# Altium footprint library NTM_Connectors.PcbLib: 10 footprints
Each footprint in its own frame and in the unit in brackets; x right, y up, seen from the top. Pads: shape width x height; smd on the part's side, far side on the other; paste and mask are expansions set on the pad; w line width, h text height; cw(c..) or ccw(c..) is an arc to the next point about the centre after c.
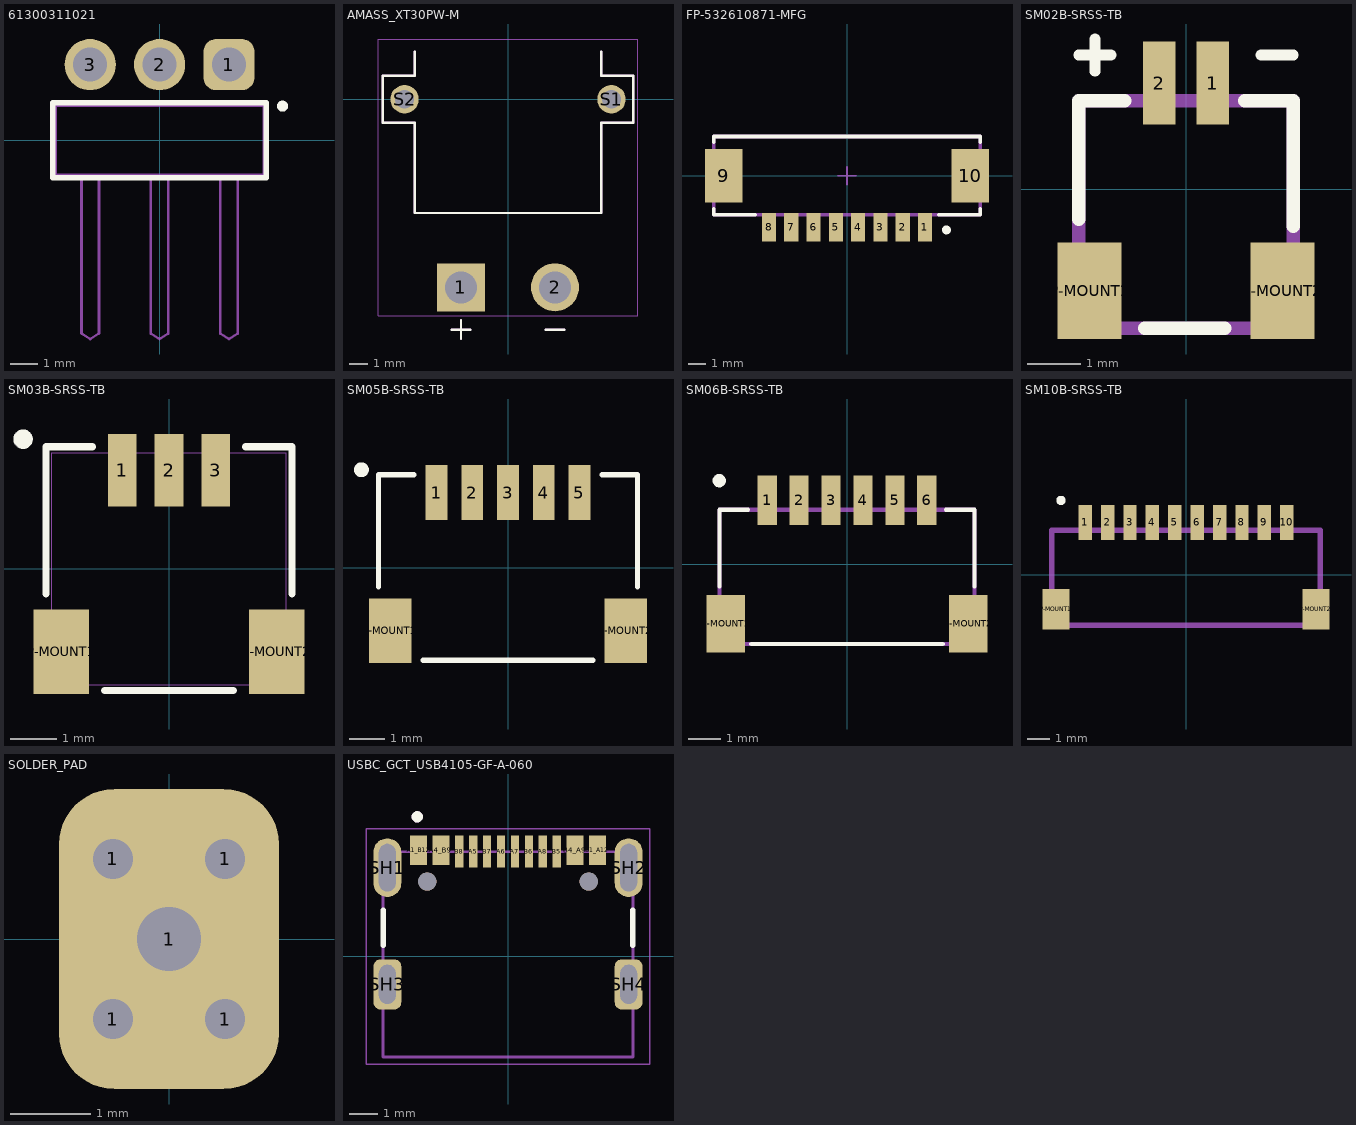
[diagram p0: the footprints below, top view; thin cyan lines are the x and y axes]

## 61300311021 [mm]
pads (3):
  rrect50% 1.875x1.875 hole 1.25 mask+0.102: 1(2.54,2.77)
  round 1.875 hole 1.25 mask+0.102: 2(0,2.77) 3(-2.54,2.77)
Top Overlay:
  circle w0.2: c4.5,1.25 r0.1
  lines w0.2: -3.91,-1.37 -3.91,1.37 3.91,1.37 3.91,-1.37 -3.91,-1.37
Top 3D Body:
  lines w0.1: -2.86,-1.27 -2.86,-7.07 -2.54,-7.27 -2.22,-7.07 -2.22,-1.27 ; 2.22,-1.27 2.22,-7.07 2.54,-7.27 2.86,-7.07 2.86,-1.27 ; -0.32,-1.27 -0.32,-7.07 0,-7.27 0.32,-7.07 0.32,-1.27 ; -0.32,-1.27 -3.81,-1.27 -3.81,1.27 3.81,1.27 3.81,-1.27 0.32,-1.27 ; -0.32,-1.27 0.32,-1.27
3D body "step_temp.STEP": height 2.54, standoff -3, extent -3.81,-7.27 3.81,3.09

## AMASS_XT30PW-M [mm]
height 5
pads (4):
  rect 2.55x2.55 / inner round 2.55 / far side rect 2.55x2.55 hole 1.7: 1(-2.5,-10)
  round 2.55 hole 1.7: 2(2.5,-10)
  round 1.508 hole 1: S1(5.5,0) S2(-5.5,0)
Top Overlay:
  lines w0.127: -4.95,2.52 -4.95,1.25 -6.65,1.25 -6.65,-1.25 -4.95,-1.25 -4.95,-6.05 4.95,-6.05 4.95,-1.25 6.65,-1.25 6.65,1.25 4.95,1.25 4.95,2.52 ; -3,-12.25 -2,-12.25 ; -2.5,-12.75 -2.5,-11.75 ; 2,-12.25 3,-12.25
Top 3D Body:
  lines w0.127: -4.95,2.52 -4.95,1.25 -6.65,1.25 -6.65,-1.25 -4.95,-1.25 -4.95,-6.05 4.95,-6.05 4.95,-1.25 6.65,-1.25 6.65,1.25 4.95,1.25 4.95,2.52 ; -3,-12.25 -2,-12.25 ; -2.5,-12.75 -2.5,-11.75 ; 2,-12.25 3,-12.25
Mechanical 15:
  lines w0.05: -6.9,-11.525 6.9,-11.525 6.9,3.2 -6.9,3.2 -6.9,-11.525
3D body "step_temp.STEP": height 5, standoff -2, extent -6.65,-11 6.65,2.95

## FP-532610871-MFG [mm]
pads (10):
  rect 0.8x1.6 smd paste+0 mask+0.051: 1(4.375,-2.9) 2(3.125,-2.9) 3(1.875,-2.9) 4(0.625,-2.9) 5(-0.625,-2.9) 6(-1.875,-2.9) 7(-3.125,-2.9) 8(-4.375,-2.9)
  rect 2.1x3 smd paste+0 mask+0.051: 9(-6.925,0) 10(6.925,0)
Top Overlay:
  circle w0.25: c5.588,-3.048 r0.125
  lines w0.2: -7.475,-1.875 -7.475,-2.2 -5.15,-2.2 ; -7.475,1.875 -7.475,2.2 7.475,2.2 7.475,1.875 ; 5.15,-2.2 7.475,-2.2 7.475,-1.875
Top 3D Body:
  lines w0.2: -7.475,-2.2 7.475,-2.2 7.475,2.2 -7.475,2.2 -7.475,-2.2
Top Component Center:
  lines w0.1: -0.5,0 0.5,0 ; 0,-0.5 0,0.5
3D body "Conn_Molex_532610871_eec.STEP": height 0.25, standoff 0, extent -8.075,-3.8 8.075,2.3

## SM02B-SRSS-TB [mm]
pads (4):
  rect 0.6x1.55 smd paste+0 mask+0.051: 1(0.5,1.975) 2(-0.5,1.975)
  rect 1.2x1.8 smd paste+0 mask+0.051: P-MOUNT1(-1.8,-1.9) P-MOUNT2(1.8,-1.9)
Top Overlay:
  lines w0.2: -2,2.5 -1.4,2.5 ; -1.7,2.2 -1.7,2.8 ; 1.4,2.5 2,2.5
  lines w0.254: -2,-0.563 -2,1.65 -1.145,1.65 ; -0.767,-2.6 0.722,-2.6 ; 1.1,1.65 2,1.65 2,-0.697
Top 3D Body:
  lines w0.254: -2,-2.6 -2,1.65 2,1.65 2,-2.6 -2,-2.6
3D body "step_temp.STEP": height 2.95, standoff 0, extent -2,-2.475 2,2.475

## SM03B-SRSS-TB [mil]
pads (5):
  rect 24x61 smd paste+0 mask+2: 1(-39.37,82.68) 2(0,82.68) 3(39.37,82.68)
  rect 47x71 smd mask+2: P-MOUNT1(-90.55,-69.88) P-MOUNT2(90.55,-69.88)
Top Overlay:
  circle w10: c-122.64,108.81 r3.15
  lines w6: -103.43,-21.28 -103.43,102.44 -64.47,102.44 ; -53.95,-102.44 53.95,-102.44 ; 64.47,102.44 103.43,102.44 103.43,-21.28
Top 3D Body:
  lines w1: -98.43,-97.44 98.43,-97.44 98.43,97.44 -98.43,97.44 -98.43,-97.44
3D body "SM03B-SRSS-TB(LF)(SN)--3DModel-STEP-56544.STEP": height 116.15, standoff -0.39, extent -98.43,-97.24 98.43,97.64

## SM05B-SRSS-TB [mil]
pads (7):
  rect 24x61 smd paste+0 mask+2: 1(-78.74,82.68) 2(-39.37,82.68) 3(0,82.68) 4(39.37,82.68) 5(78.74,82.68)
  rect 47x71 smd mask+2: P-MOUNT1(-129.92,-69.88) P-MOUNT2(129.92,-69.88)
Top Overlay:
  circle w10: c-161.64,107.81 r3.15
  lines w6: -142.8,-21.28 -142.8,102.44 -103.84,102.44 ; -93.31,-102.44 93.31,-102.44 ; 103.86,102.44 142.81,102.44 142.8,-21.28
3D body "step_temp.STEP": height 116.14, standoff 0, extent -137.8,-97.44 137.8,97.44

## SM06B-SRSS-TB [mm]
pads (8):
  rect 0.6x1.55 smd mask+0.051: 1(-2.5,2) 2(-1.5,2) 3(-0.5,2) 4(0.5,2) 5(1.5,2) 6(2.5,2)
  rect 1.2x1.8 smd mask+0.051: P-MOUNT1(-3.8,-1.875) P-MOUNT2(3.8,-1.875)
Top Overlay:
  circle w0.254: c-4.004,2.611 r0.08
  lines w0.127: -4,-0.7 -4,1.7 -3.1,1.7 ; -3,-2.5 3,-2.5 ; 3.1,1.7 4,1.7 4,-0.7
Top 3D Body:
  lines w0.127: -4,-2.5 4,-2.5 4,1.7 -4,1.7 -4,-2.5
3D body "step_temp.STEP": height 2.95, standoff 0, extent -4,-2.634 4,2.316

## SM10B-SRSS-TB [mm]
pads (12):
  rect 0.6x1.55 smd mask+0.051: 1(-4.5,2.342) 2(-3.5,2.342) 3(-2.5,2.342) 4(-1.5,2.342) 5(-0.5,2.342) 6(0.5,2.342) 7(1.5,2.342) 8(2.5,2.342) 9(3.5,2.342) 10(4.5,2.342)
  rect 1.2x1.8 smd mask+0.051: P-MOUNT1(-5.8,-1.533) P-MOUNT2(5.8,-1.533)
Top Overlay:
  circle w0.254: c-5.585,3.329 r0.08
Mechanical 3:
  lines w0.254: -6,-2.25 -6,2 6,2 6,-2.25 -6,-2.25
Mechanical 7:
  lines w0.254: -6,-0.423 -6,2 -5.018,2 ; -4.976,-2.25 0,-2.25 4.993,-2.25 ; 5.022,2 6,2 6,-0.423
3D body "SM10B-SRSS-TB_LF__SN_.stp": height 2.97, standoff 0, extent -6,-2.3 6,2.65

## SOLDER_PAD [mm]
pads (5):
  round 0.9 hole 0.5 mask+0: 1(-0.7,-1) 1(-0.7,1) 1(0.7,-1) 1(0.7,1)
  rrect50% 2.75x3.75 hole 0.8 mask+0.051: 1(0,0)

## USBC_GCT_USB4105-GF-A-060 [mm]
height 3.31
pads (18):
  rect 0.6x1.05 smd paste+0 mask+0.025: A1_B12(-3.2,3.805) A4_B9(-2.4,3.805) B1_A12(3.2,3.805) B4_A9(2.4,3.805)
  rect 0.3x1.15 smd paste+0 mask+0.025: A5(-1.25,3.755) A6(-0.25,3.755) A7(0.25,3.755) A8(1.25,3.755) B5(1.75,3.755) B6(0.75,3.755) B7(-0.75,3.755) B8(-1.75,3.755)
  oval 1x2.1 hole 0.6 slot 1.7 at 90 deg: SH1(-4.32,3.18) SH2(4.32,3.18)
  rrect50% 1x1.8 hole 0.6 slot 1.4 at 90 deg: SH3(-4.32,-1) SH4(4.32,-1)
  round 0.65 hole 0.65 unplated mask+0: ""(-2.89,2.68) ""(2.89,2.68)
Top Overlay:
  circle w0.2: c-3.25,5 r0.1
  lines w0.2: -4.47,0.4 -4.47,1.65 ; 4.47,0.4 4.47,1.65
Top 3D Body:
  circle w0.2: c-3.25,5 r0.1
  lines w0.1: -4.47,-3.6 4.47,-3.6 4.47,3.75 -4.47,3.75 -4.47,-3.6
Mechanical 15:
  lines w0.05: -5.07,-3.85 -5.07,4.58 5.07,4.58 5.07,-3.85 -5.07,-3.85
3D body "step_temp.STEP": height 3.31, standoff -0.85, extent -4.47,-3.6 4.47,4.11